# Altium footprint library Passive-Ind.PcbLib: 61 footprints (part 1 of 4)
Each footprint in its own frame and in the unit in brackets; x right, y up, seen from the top. Pads: shape width x height; smd on the part's side, far side on the other; paste and mask are expansions set on the pad; w line width, h text height; cw(c..) or ccw(c..) is an arc to the next point about the centre after c.
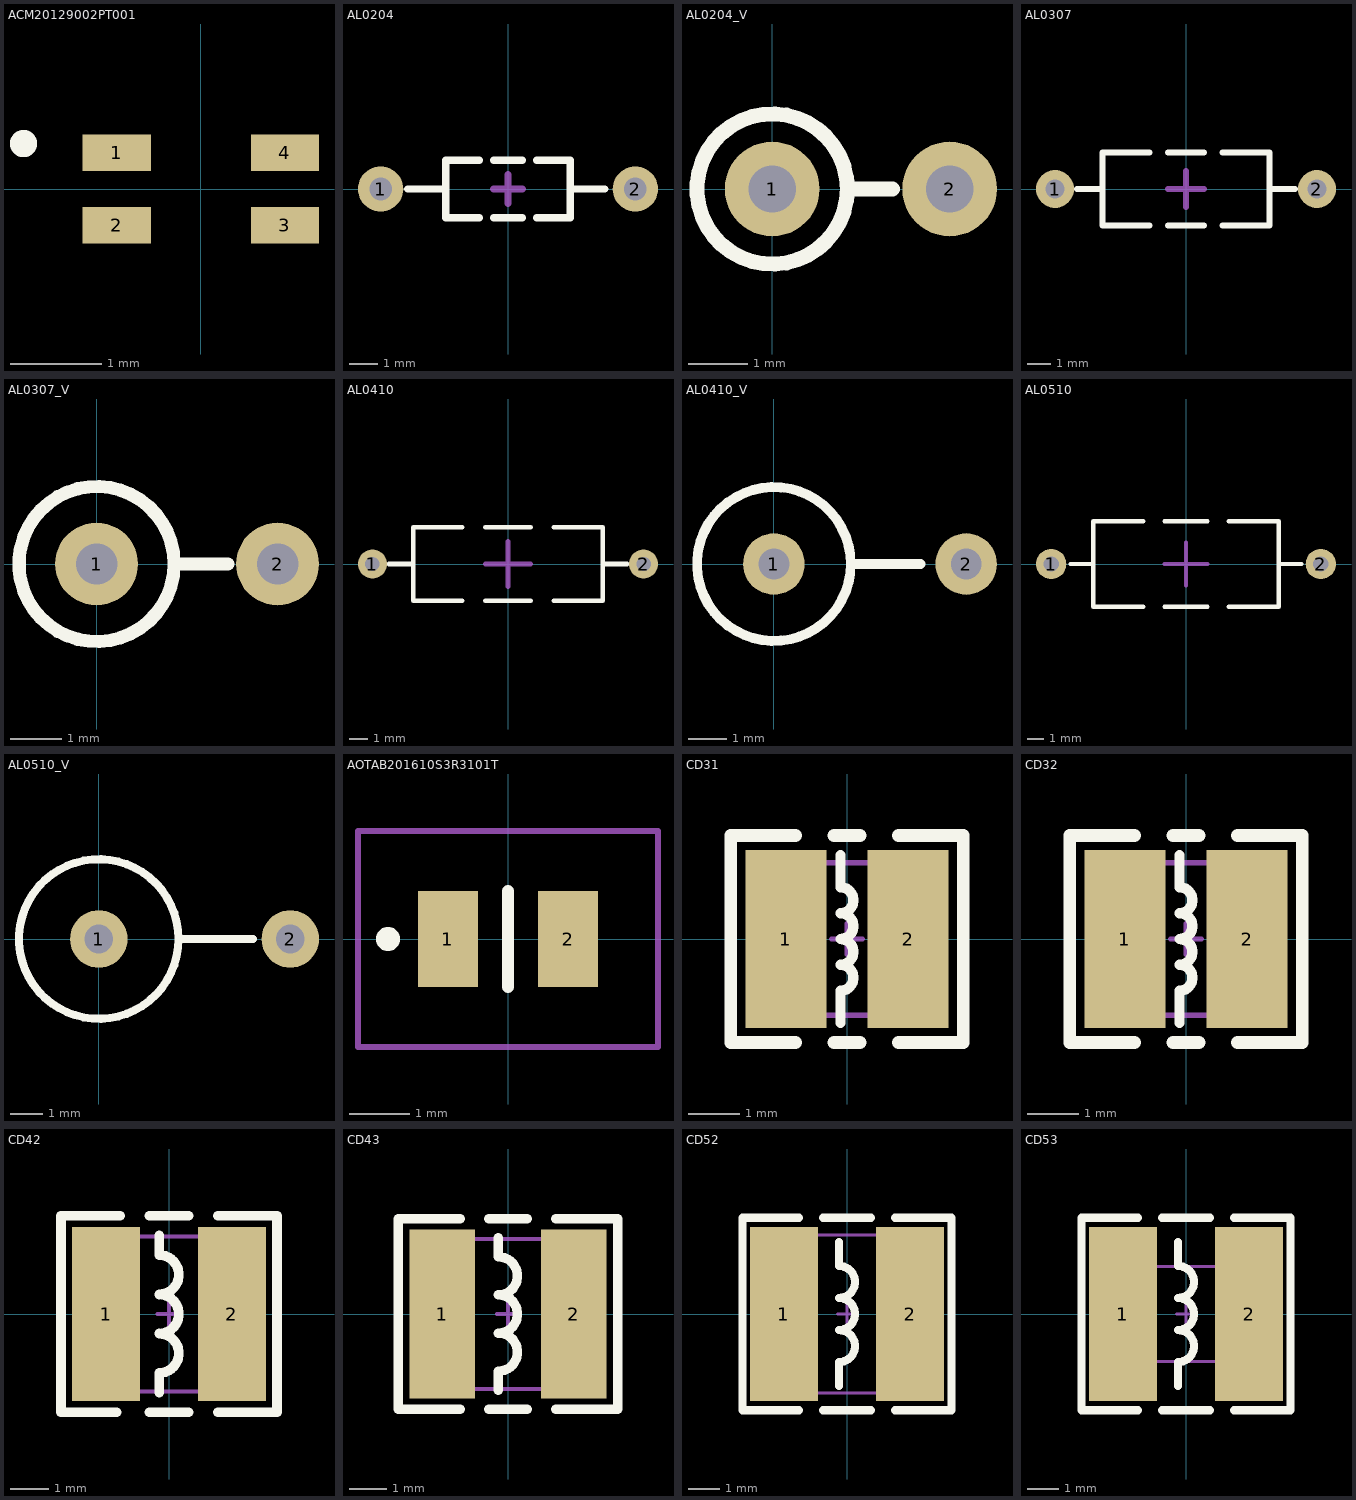
[diagram p0: the footprints below, top view; thin cyan lines are the x and y axes]

## ACM20129002PT001 [mm]
pads (4):
  rect 0.75x0.4 smd: 1(-0.925,0.4) 2(-0.925,-0.4) 3(0.925,-0.4) 4(0.925,0.4)
Top Overlay:
  lines w0.2: -2,0.5 ccw(c-1.95,0.5) -1.9,0.5 ; -2,0.5 cw(c-1.95,0.5) -1.9,0.5 ; -2,0.5 ccw(c-1.95,0.5) -1.9,0.5
Top Designator:
  text ".Designator" at 7.268,-0.508 h1.52
3D body "ACM2012-900-2P-T001.stp": height 1.4, standoff 0, extent -1.26,-0.6 1.26,0.6

## AL0204 [mm] "9*2*4mm（脚距，直径，长度）"
pads (2):
  round 1.6 hole 0.8: 1(-4.5,0) 2(4.5,0)
Top Overlay:
  lines w0.254: -3.556,0 -2.2,0 ; -1.016,-1.016 -2.2,-1.016 -2.2,1.016 -1.016,1.016 ; -0.508,-1.016 0.508,-1.016 ; -0.508,1.016 0.508,1.016 ; 1.016,-1.016 2.2,-1.016 2.2,1.016 1.016,1.016 ; 2.2,0 3.429,0
Top Designator:
  text ".Designator" at 7.618,-0.508 h1.52
Bottom Courtyard:
  lines w0.254: -0.508,0 0.508,0 ; 0,-0.508 0,0.508
3D body "AL0204.STEP": height 2.07, standoff -3.5, extent -4.75,-1.016 4.75,1.017

## AL0204_V [mm] "3*2*4mm（脚距，直径，长度）"
pads (2):
  round 1.6 hole 0.8: 1(0,0) 2(3,0)
Top Overlay:
  circle w0.254: c0,0 r1.27
  lines w0.254: 1.27,0 2.032,0
Top Designator:
  text ".Designator" at 8.87,-0.508 h1.52
3D body "AL0204_V.STEP": height 5.48, standoff -3.5, extent -1.084,-1.009 3.175,1.009

## AL0307 [mm] "11*3*7mm（脚距，直径，长度）"
pads (2):
  round 1.6 hole 0.8: 1(-5.5,0) 2(5.5,0)
Top Overlay:
  lines w0.254: -4.572,0 -3.5,0 ; -1.524,-1.524 -3.5,-1.524 -3.5,1.524 -1.524,1.524 ; -0.762,-1.524 0.762,-1.524 ; -0.762,1.524 0.762,1.524 ; 1.524,-1.524 3.5,-1.524 3.5,1.524 1.524,1.524 ; 3.5,0 4.572,0
Top Designator:
  text ".Designator" at 7.618,-0.508 h1.52
Bottom Courtyard:
  lines w0.254: -0.762,0 0.762,0 ; 0,-0.762 0,0.762
3D body "AL0307.STEP": height 3.06, standoff -3.5, extent -5.715,-1.508 5.835,1.508

## AL0307_V [mm] "3.5*3*7mm（脚距，直径，长度）"
pads (2):
  round 1.6 hole 0.8: 1(0,0) 2(3.5,0)
Top Overlay:
  circle w0.254: c0,0 r1.5
  lines w0.254: 1.5,0 2.54,0
Top Designator:
  text ".Designator" at 9.005,-0.508 h1.52
3D body "AL0307_V.STEP": height 8.81, standoff -3.5, extent -1.487,-1.524 3.81,1.514

## AL0410 [mm] "15*4*10.5mm（脚距，直径，长度）"
pads (2):
  round 1.6 hole 0.8: 1(-7.5,0) 2(7.5,0)
Top Overlay:
  lines w0.254: -6.604,0 -5.25,0 ; -2.54,-2.032 -5.25,-2.032 -5.25,2.032 -2.54,2.032 ; -1.27,-2.032 1.27,-2.032 ; -1.27,2.032 1.27,2.032 ; 2.54,-2.032 5.25,-2.032 5.25,2.032 2.54,2.032 ; 5.25,0 6.604,0
Top Designator:
  text ".Designator" at 7.618,-0.508 h1.52
Bottom Courtyard:
  lines w0.254: -1.27,0 1.27,0 ; 0,-1.27 0,1.27
3D body "AL0410.STEP": height 4.06, standoff -3.5, extent -7.747,-2.005 7.803,2.005

## AL0410_V [mm] "5*4*10.5mm（脚距，直径，长度）"
pads (2):
  round 1.6 hole 0.8: 1(0,0) 2(5,0)
Top Overlay:
  circle w0.254: c0,0 r2
  lines w0.254: 2,0 3.81,0
Top Designator:
  text ".Designator" at 9.505,-0.508 h1.52
3D body "AL0410_V.STEP": height 12.39, standoff -3.5, extent -2.001,-2.004 5.334,2.004

## AL0510 [mm] "16*5*10.5mm（脚距，直径，长度）"
pads (2):
  round 1.8 hole 0.9: 1(-8,0) 2(8,0)
Top Overlay:
  lines w0.254: -6.858,0 -5.5,0 ; -2.54,-2.54 -5.5,-2.54 -5.5,2.54 -2.54,2.54 ; -1.27,-2.54 1.27,-2.54 ; -1.27,2.54 1.27,2.54 ; 2.54,-2.54 5.5,-2.54 5.5,2.54 2.54,2.54 ; 5.5,0 6.858,0
Top Designator:
  text ".Designator" at 7.618,-0.508 h1.52
Bottom Courtyard:
  lines w0.254: -1.27,0 1.27,0 ; 0,-1.27 0,1.27
3D body "AL0510.STEP": height 5.06, standoff -3.5, extent -8.318,-2.505 8.382,2.505

## AL0510_V [mm] "6*5*10.5mm（脚距，直径，长度）"
pads (2):
  round 1.8 hole 0.9: 1(0,0) 2(6,0)
Top Overlay:
  circle w0.254: c0,0 r2.5
  lines w0.254: 2.5,0 4.826,0
Top Designator:
  text ".Designator" at 9.805,-0.508 h1.52
3D body "AL0510_V.STEP": height 13.35, standoff -3.5, extent -2.51,-2.507 6.35,2.507

## AOTAB201610S3R3101T [mm]
pads (2):
  rect 1x1.6 smd: 1(-1,0) 2(1,0)
Top Overlay:
  lines w0.2: 0,-0.8 0,0.8 ; -2,-0.1 ccw(c-2,0) -2,0.1 ccw(c-2,0) -2,-0.1
Top Courtyard:
  lines w0.1: -2.5,-1.8 -2.5,1.8 2.5,1.8 2.5,-1.8 -2.5,-1.8
3D body "AOTA-B201610S3R3-101-T.stp": height 1, standoff 0, extent -1,-0.8 1,0.8

## CD31 [mm] "3.5*3*1mm（长宽高）"
pads (2):
  rect 1.6x3.5 smd: 1(-1.2,0) 2(1.2,0)
Top Overlay:
  lines w0.203: -0.127,-1.651 -0.127,-1.016 ccw(c-0.127,-0.762) -0.127,-0.508 ccw(c-0.127,-0.254) -0.127,0 ccw(c-0.127,0.254) -0.127,0.508 ccw(c-0.127,0.762) -0.127,1.016 -0.127,1.651
  lines w0.254: -1.016,-2.032 -2.286,-2.032 -2.286,2.032 -1.016,2.032 ; -0.254,-2.032 0.254,-2.032 ; -0.254,2.032 0.254,2.032 ; 1.016,-2.032 2.286,-2.032 2.286,2.032 1.016,2.032
Top Component Outline:
  lines w0.1: -1.7,-1.5 -1.7,1.5 1.7,1.5 1.7,-1.5 -1.7,-1.5
Top Component Center:
  lines w0.1: -0.3,0 0.3,0 ; 0,-0.3 0,0.3
Top Value:
  text "'.Comment'" at -2.754,-0.38 h1.27
Top Designator:
  text ".Designator" at -3.774,-0.319 h1.52
3D body "CD31.STEP": height 1.2, standoff 0, extent -1.718,-1.476 1.718,1.524

## CD32 [mm] "3.5*3*2mm（长宽高）"
pads (2):
  rect 1.6x3.5 smd: 1(-1.2,0) 2(1.2,0)
Top Overlay:
  lines w0.203: -0.127,-1.651 -0.127,-1.016 ccw(c-0.127,-0.762) -0.127,-0.508 ccw(c-0.127,-0.254) -0.127,0 ccw(c-0.127,0.254) -0.127,0.508 ccw(c-0.127,0.762) -0.127,1.016 -0.127,1.651
  lines w0.254: -1.016,-2.032 -2.286,-2.032 -2.286,2.032 -1.016,2.032 ; -0.254,-2.032 0.254,-2.032 ; -0.254,2.032 0.254,2.032 ; 1.016,-2.032 2.286,-2.032 2.286,2.032 1.016,2.032
Top Component Outline:
  lines w0.1: -1.7,-1.5 -1.7,1.5 1.7,1.5 1.7,-1.5 -1.7,-1.5
Top Component Center:
  lines w0.1: -0.3,0 0.3,0 ; 0,-0.3 0,0.3
Top Value:
  text "'.Comment'" at -2.754,-0.38 h1.27
Top Designator:
  text ".Designator" at -3.774,-0.319 h1.52
3D body "CD32.STEP": height 2.15, standoff 0.05, extent -1.707,-1.5 1.707,1.5

## CD42 [mm] "4.5*4*2mm（长宽高）"
pads (2):
  rect 1.75x4.5 smd: 1(-1.625,0) 2(1.625,0)
Top Overlay:
  lines w0.254: -1.353,-2.54 -2.794,-2.54 -2.794,2.54 -1.27,2.54 ; -0.508,-2.54 0.508,-2.54 ; -0.508,2.54 0.508,2.54 ; -0.254,-2.032 -0.254,-1.524 ccw(c-0.254,-1.016) -0.254,-0.508 ccw(c-0.254,0) -0.254,0.508 ccw(c-0.254,1.016) -0.254,1.524 -0.254,2.032 ; 1.27,-2.54 2.794,-2.54 2.794,2.54 1.27,2.54
Top Component Outline:
  lines w0.1: -2.1,-2 -2.1,2 2.3,2 2.3,-2 -2.1,-2
Top Component Center:
  lines w0.1: -0.3,0 0.3,0 ; 0,-0.3 0,0.3
Top Value:
  text "'.Comment'" at -2.754,-0.38 h1.27
Top Designator:
  text ".Designator" at -3.774,-0.319 h1.52
3D body "CD42.STEP": height 2.1, standoff 0, extent -2.11,-2 2.31,2

## CD43 [mm] "4.5*4*3.2mm（长宽高）"
pads (2):
  rect 1.75x4.5 smd: 1(-1.75,0) 2(1.75,0)
Top Overlay:
  lines w0.254: -1.27,-2.54 -2.921,-2.54 -2.921,2.54 -1.27,2.54 ; -0.508,-2.54 0.508,-2.54 ; -0.508,2.54 0.508,2.54 ; -0.254,-2.032 -0.254,-1.524 ccw(c-0.254,-1.016) -0.254,-0.508 ccw(c-0.254,0) -0.254,0.508 ccw(c-0.254,1.016) -0.254,1.524 -0.254,2.032 ; 1.27,-2.54 2.921,-2.54 2.921,2.54 1.27,2.54
Top Component Outline:
  lines w0.1: -2.1,-2 -2.1,2 2.3,2 2.3,-2 -2.1,-2
Top Component Center:
  lines w0.1: -0.3,0 0.3,0 ; 0,-0.3 0,0.3
Top Value:
  text "'.Comment'" at -2.754,-0.38 h1.27
Top Designator:
  text ".Designator" at -3.774,-0.319 h1.52
3D body "CD43.STEP": height 3.3, standoff 0, extent -2.11,-2 2.31,2

## CD52 [mm] "5.8*5.2*3mm（长宽高）"
pads (2):
  rect 2.15x5.5 smd: 1(-2,0) 2(2,0)
Top Overlay:
  lines w0.254: -1.524,-3.048 -3.302,-3.048 -3.302,3.048 -1.524,3.048 ; -0.762,-3.048 0.762,-3.048 ; -0.762,3.048 0.762,3.048 ; -0.254,-2.286 -0.254,-1.524 ccw(c-0.254,-1.016) -0.254,-0.508 ccw(c-0.254,0) -0.254,0.508 ccw(c-0.254,1.016) -0.254,1.524 -0.254,2.286 ; 1.524,-3.048 3.302,-3.048 3.302,3.048 1.524,3.048
Top Component Outline:
  lines w0.1: -2.7,-2.5 3,-2.5 3,2.5 -2.7,2.5 -2.7,-2.5
Top Component Center:
  lines w0.1: -0.3,0 0.3,0 ; 0,-0.3 0,0.3
Top Value:
  text "'.Comment'" at -2.754,-0.38 h1.27
Top Designator:
  text ".Designator" at -3.774,-0.319 h1.52
3D body "CD52.STEP": height 3.2, standoff 0, extent -2.747,-2.486 3.001,2.514

## CD53 [mm] "5.8*5.2*3.5mm（长宽高）"
pads (2):
  rect 2.15x5.5 smd: 1(-2,0) 2(2,0)
Top Overlay:
  lines w0.254: -1.524,-3.048 -3.302,-3.048 -3.302,3.048 -1.524,3.048 ; -0.762,-3.048 0.762,-3.048 ; -0.762,3.048 0.762,3.048 ; -0.254,-2.286 -0.254,-1.524 ccw(c-0.254,-1.016) -0.254,-0.508 ccw(c-0.254,0) -0.254,0.508 ccw(c-0.254,1.016) -0.254,1.524 -0.254,2.286 ; 1.524,-3.048 3.302,-3.048 3.302,3.048 1.524,3.048
Top Component Outline:
  lines w0.1: -1.7,-1.5 1.7,-1.5 1.7,1.5 -1.7,1.5 -1.7,-1.5
Top Component Center:
  lines w0.1: -0.3,0 0.3,0 ; 0,-0.3 0,0.3
Top Value:
  text "'.Comment'" at -2.754,-0.38 h1.27
Top Designator:
  text ".Designator" at -3.774,-0.319 h1.52
3D body "CD53.STEP": height 3.6, standoff 0, extent -2.827,-2.373 2.921,2.627